# Altium schematic symbol library Inductor.SchLib: 326 symbols (part 4 of 7)
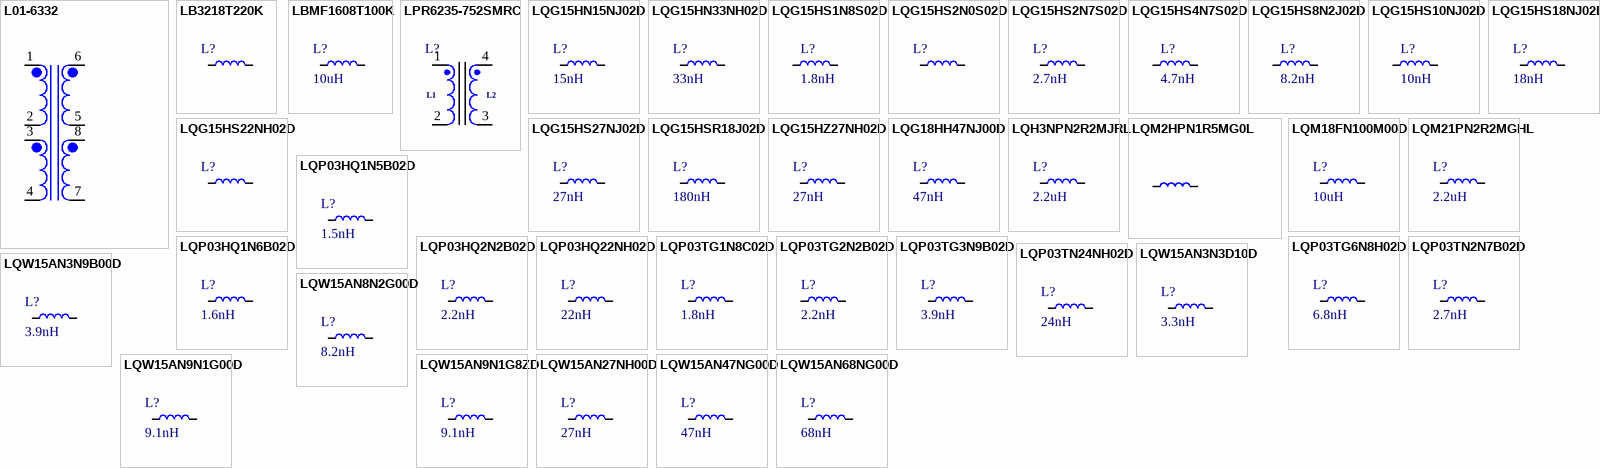
[diagram p11: symbols L01-6332 to LQW15AN68NG00D]

## LQM21PN2R2MGHL
designator L?, comment 2.2uH
FIXED IND 2.2UH 1.3A 156MOHM SMD; Manufacturer: Murata; Manufacturer Part Number: LQM21PN2R2MGHL; Item Type: Fixed Inductors; Core Material: Ferrite; Saturation Current: 450mA; Shielding: Shielded; DC Resistance (DCR): 156mR; Self Resonant Frequency: 40MHz; Test Frequency: 1MHz; Tolerance: 20%; RMS Current (Irms): 1.7A; Supplier: Mouser; LCSC Part Number: C341781; RoHS: Yes; Stock: 122655; Pricing: 1=0.3, 10=0.246, 50=0.246, 100=0.203, 1000=0.167, 10000=0.129 (USD); Mounting Technology: Surface Mount; Case/Package: 0805; Case Code (Metric): 2012; Case Code (Imperial): 0805; Min Operating Temperature: -40°C; Max Operating Temperature: 85°C; Packaging: Cut Tape; Value: 2.2uH; Current Rating: 1.3A; Series: LQM21PN_GH; ESR: 156mR; Length: 0.079inch; Width: 0.049inch; Height - Seated (Max): 0.039inch; RoHS Compliant: Yes; ComponentLink1URL: http://search.murata.co.jp/Ceramy/image/img/P02/JELF243B-0040.pdf?src-supplier=Digikey; ComponentLink1Description: http://search.murata.co.jp/Ceramy/image/img/P02/JELF243B-0040.pdf?src-supplier=Digikey; ComponentLink2URL: http://www.murata.com/~/media/webrenewal/support/library/catalog/products/inductor/chip/o05e.ashx?src-supplier=Digikey; ComponentLink2Description: http://www.murata.com/~/media/webrenewal/support/library/catalog/products/inductor/chip/o05e.ashx?src-supplier=Digikey
footprint IND-0805 (Inductor 0805)
pins: 1, 2

## LQP03HQ1N5B02D
designator L?, comment 1.5nH
FIXED IND 1.5NH 1A 50 MOHM SMD; Manufacturer: Murata; Manufacturer Part Number: LQP03HQ1N5B02D; Item Type: Inductor; Q Factor: 20NUMBER; Value: 50mR; Supplier: Mouser; LCSC Part Number: C2041489; RoHS: Yes; Stock: 37991; Pricing: 1=0.16, 10=0.104, 50=0.104, 100=0.081, 1000=0.065, 10000=0.057 (USD); RMS Current (Irms): 1A; ESR: 50mR; Height: 420um; ComponentLink1URL: http://www.farnell.com/datasheets/2616670.pdf?src-supplier=Farnell; ComponentLink1Description: http://www.farnell.com/datasheets/2616670.pdf?src-supplier=Farnell; ComponentLink2URL: https://search.murata.co.jp/Ceramy/image/img/P02/JELF243C-0021.pdf?src-supplier=Digikey; ComponentLink2Description: https://search.murata.co.jp/Ceramy/image/img/P02/JELF243C-0021.pdf?src-supplier=Digikey; ComponentLink3URL: http://search.murata.co.jp/Ceramy/image/img/P02/JELF243C-0021.pdf?src-supplier=Digikey; ComponentLink3Description: http://search.murata.co.jp/Ceramy/image/img/P02/JELF243C-0021.pdf?src-supplier=Digikey; ComponentLink4URL: https://datasheet.octopart.com/LQP03HQ1N5B02D-Murata-datasheet-68295820.pdf?src-supplier=Future+Electronics; ComponentLink4Description: https://datasheet.octopart.com/LQP03HQ1N5B02D-Murata-datasheet-68295820.pdf?src-supplier=Future+Electronics; ComponentLink5URL: http://www.farnell.com/datasheets/2616670.pdf?src-supplier=Newark; ComponentLink5Description: http://www.farnell.com/datasheets/2616670.pdf?src-supplier=Newark
footprint IND-0201
pins: 1, 2

## LQP03HQ1N6B02D
designator L?, comment 1.6nH
FIXED IND 1.6NH 1A 50 MOHM SMD; Manufacturer: Murata; Manufacturer Part Number: LQP03HQ1N6B02D; Core Material: Non-Magnetic; Shielding: Unshielded; DC Resistance (DCR): 50mR; Self Resonant Frequency: 10GHz; Test Frequency: 500MHz; Item Type: Inductor; Supplier: Digi-Key; Supplier Part Number: 490-13883-1-ND; RoHS: Yes; Category: Fixed Inductors; Stock: 27606; Pricing: 1=0.16, 10=0.145, 25=0.1236, 50=0.109, 100=0.1, 250=0.09088, 500=0.08544, 1000=0.06545, 2500=0.06181 (USD); Mounting Technology: Surface Mount; Case/Package: 0201; Case Code (Imperial): 0201; Case Code (Metric): 0603; Min Operating Temperature: -55°C; Max Operating Temperature: 125°C; Packaging: Cut Tape; Value: 1.6nH; Current Rating: 1A; Series: LQP03; RoHS Compliant: Yes; ComponentLink1URL: http://search.murata.co.jp/Ceramy/image/img/P02/JELF243C-0021.pdf?src-supplier=Digi-Key; ComponentLink1Description: http://search.murata.co.jp/Ceramy/image/img/P02/JELF243C-0021.pdf?src-supplier=Digi-Key; LCSC Part Number: C237384
footprint IND-0201
pins: 1, 2

## LQP03HQ2N2B02D
designator L?, comment 2.2nH
FIXED IND 2.2NH 600MA 120MOHM SM; Manufacturer: Murata; Manufacturer Part Number: LQP03HQ2N2B02D; Item Type: Inductors; Q Factor: 20NUMBER; Value: 120mR; Supplier: Mouser; LCSC Part Number: C1329438; RoHS: Yes; Stock: 22323; Pricing: 1=0.15, 10=0.096, 50=0.096, 100=0.075, 1000=0.061, 10000=0.056 (USD); RMS Current (Irms): 600mA; ESR: 120mR; Height: 420um; ComponentLink1URL: https://datasheet.octopart.com/LQP03HQ2N2B02D-Murata-datasheet-68295820.pdf?src-supplier=Future+Electronics; ComponentLink1Description: https://datasheet.octopart.com/LQP03HQ2N2B02D-Murata-datasheet-68295820.pdf?src-supplier=Future+Electronics; ComponentLink2URL: http://search.murata.co.jp/Ceramy/image/img/P02/JELF243C-0021.pdf?src-supplier=Digikey; ComponentLink2Description: http://search.murata.co.jp/Ceramy/image/img/P02/JELF243C-0021.pdf?src-supplier=Digikey; ComponentLink3URL: https://search.murata.co.jp/Ceramy/image/img/P02/JELF243C-0021.pdf?src-supplier=Digikey; ComponentLink3Description: https://search.murata.co.jp/Ceramy/image/img/P02/JELF243C-0021.pdf?src-supplier=Digikey; ComponentLink4URL: https://datasheet.octopart.com/LQP03HQ2N2B02D-Murata-datasheet-112158819.pdf?src-supplier=Newark; ComponentLink4Description: https://datasheet.octopart.com/LQP03HQ2N2B02D-Murata-datasheet-112158819.pdf?src-supplier=Newark; ComponentLink5URL: https://datasheet.octopart.com/LQP03HQ2N2B02D-Murata-datasheet-150539062.pdf?src-supplier=Arrow.cn; ComponentLink5Description: https://datasheet.octopart.com/LQP03HQ2N2B02D-Murata-datasheet-150539062.pdf?src-supplier=Arrow.cn
footprint IND-0201
pins: 1, 2

## LQP03HQ22NH02D
designator L?, comment 22nH
FIXED IND 22NH 250MA 820MOHM SMD; Manufacturer: Murata; Manufacturer Part Number: LQP03HQ22NH02D; Item Type: Inductors; Supplier: Mouser; LCSC Part Number: C1329450; RoHS: Yes; Stock: 18723; Pricing: 1=0.11, 10=0.072, 50=0.072, 100=0.056, 1000=0.046, 10000=0.045 (USD); ComponentLink1URL: https://datasheet.octopart.com/LQP03HQ22NH02D-Murata-datasheet-140317290.pdf?src-supplier=Farnell; ComponentLink1Description: https://datasheet.octopart.com/LQP03HQ22NH02D-Murata-datasheet-140317290.pdf?src-supplier=Farnell; ComponentLink2URL: https://search.murata.co.jp/Ceramy/image/img/P02/JELF243C-0021.pdf?src-supplier=Digikey; ComponentLink2Description: https://search.murata.co.jp/Ceramy/image/img/P02/JELF243C-0021.pdf?src-supplier=Digikey; ComponentLink3URL: http://search.murata.co.jp/Ceramy/image/img/P02/JELF243C-0021.pdf?src-supplier=Digikey; ComponentLink3Description: http://search.murata.co.jp/Ceramy/image/img/P02/JELF243C-0021.pdf?src-supplier=Digikey; ComponentLink4URL: https://datasheet.octopart.com/LQP03HQ22NH02D-Murata-datasheet-68295820.pdf?src-supplier=Future+Electronics; ComponentLink4Description: https://datasheet.octopart.com/LQP03HQ22NH02D-Murata-datasheet-68295820.pdf?src-supplier=Future+Electronics; ComponentLink5URL: https://datasheet.octopart.com/LQP03HQ22NH02D-Murata-datasheet-142046015.pdf?src-supplier=Arrow.cn; ComponentLink5Description: https://datasheet.octopart.com/LQP03HQ22NH02D-Murata-datasheet-142046015.pdf?src-supplier=Arrow.cn
footprint IND-0201
pins: 1, 2

## LQP03TG1N8C02D
designator L?, comment 1.8nH
FIXED IND 1.8NH 500MA 200MOHM SM; Manufacturer: Murata; Manufacturer Part Number: LQP03TG1N8C02D; Item Type: Inductors; Shielding: Unshielded; DC Resistance (DCR): 200mR; Self Resonant Frequency: 12.5GHz; Test Frequency: 500MHz; Supplier: Mouser; LCSC Part Number: C341782; RoHS: Yes; Stock: 23430; Pricing: 1=0.1, 10=0.032, 50=0.032, 100=0.022, 1000=0.016, 10000=0.01 (USD); Mounting Technology: Surface Mount; Case/Package: 0201; Case Code (Metric): 0603; Case Code (Imperial): 0201; Min Operating Temperature: -55°C; Max Operating Temperature: 125°C; Package Quantity: 15000; Packaging: Tape and Reel; Current Rating: 500mA; Value: 1.8nH; DC Current: 500mA; Series: LQP03TG_02; Technology: THIN FILM; Length: 0.024inch; Width: 0.012inch; Height - Seated (Max): 0.013inch; Depth: 0.33mm; Military Standard: Not; RoHS Compliant: Yes; ComponentLink1URL: https://datasheet.ciiva.com/29692/jelf243c-0016-29692539.pdf?src-supplier=Digikey; ComponentLink1Description: https://datasheet.ciiva.com/29692/jelf243c-0016-29692539.pdf?src-supplier=Digikey
footprint IND-0201
pins: 1, 2

## LQP03TG2N2B02D
designator L?, comment 2.2nH
FIXED IND 2.2NH 450MA 250MOHM SM; Manufacturer: Murata; Manufacturer Part Number: LQP03TG2N2B02D; Item Type: Inductors; Shielding: Unshielded; DC Resistance (DCR): 250mR; Self Resonant Frequency: 6GHz; Test Frequency: 500MHz; Supplier: Mouser; LCSC Part Number: C341782; RoHS: Yes; Stock: 35433; Pricing: 1=0.1, 10=0.021, 50=0.021, 100=0.015, 1000=0.013, 10000=0.01 (USD); Mounting Technology: Surface Mount; Case/Package: 0201; Min Operating Temperature: -55°C; Max Operating Temperature: 125°C; Current Rating: 450mA; Packaging: Tape and Reel; Series: LQP03TG_02; Package Quantity: 15000; Value: 2.2nH; Max DC Current: 450mA; DC Current: 450mA; Technology: THIN FILM; Length: 0.024inch; Width: 0.012inch; Height: 0.3mm; Depth: 0.33mm; Height - Seated (Max): 0.013inch; Military Standard: Not; RoHS Compliant: Yes; ComponentLink1URL: https://datasheet.ciiva.com/29691/jelf243c-0016-29691343.pdf?src-supplier=Digikey; ComponentLink1Description: https://datasheet.ciiva.com/29691/jelf243c-0016-29691343.pdf?src-supplier=Digikey
footprint IND-0201
pins: 1, 2

## LQP03TG3N9B02D
designator L?, comment 3.9nH
FIXED IND 3.9NH 350MA 350MOHM SM; Manufacturer: Murata; Manufacturer Part Number: LQP03TG3N9B02D; Item Type: Inductors; Shielding: Unshielded; DC Resistance (DCR): 350mR; Self Resonant Frequency: 6GHz; Test Frequency: 500MHz; Supplier: Digikey; LCSC Part Number: C86114; RoHS: Yes; Stock: 170; Pricing: 1=0.1, 10=0.025, 25=0.0224, 50=0.0208, 100=0.0193, 250=0.01748, 500=0.0162, 1000=0.01502, 2500=0.01358 (USD); Mounting Technology: Surface Mount; Case/Package: 0201; Min Operating Temperature: -55°C; Max Operating Temperature: 125°C; Package Quantity: 15000; Packaging: Tape and Reel; Current Rating: 350mA; Value: 3.9nH; Max DC Current: 350mA; DC Current: 350mA; Series: LQP03TG_02; Technology: THIN FILM; Length: 0.024inch; Width: 0.012inch; Height: 0.3mm; Height - Seated (Max): 0.013inch; Depth: 0.33mm; Military Standard: Not; RoHS Compliant: Yes; ComponentLink1URL: https://datasheet.ciiva.com/29691/jelf243c-0016-29691349.pdf?src-supplier=Digikey; ComponentLink1Description: https://datasheet.ciiva.com/29691/jelf243c-0016-29691349.pdf?src-supplier=Digikey
footprint IND-0201
pins: 1, 2

## LQP03TG6N8H02D
designator L?, comment 6.8nH
FIXED IND 6.8NH 200MA 1.15OHM SM; Manufacturer: Murata; Manufacturer Part Number: LQP03TG6N8H02D; Tolerance: 3%; Shielding: Unshielded; DC Resistance (DCR): 1.15R; Self Resonant Frequency: 5.4GHz; Test Frequency: 500MHz; Item Type: Inductor; Supplier: Digikey; Supplier Part Number: 490-LQP03TG6N8H02DCT-ND; RoHS: Yes; Category: Fixed Inductors; Stock: 13400; Pricing: 1=0.1, 10=0.025, 25=0.024, 50=0.0204, 100=0.0172, 250=0.01644, 500=0.01494, 1000=0.01255, 2500=0.01075 (USD); Mounting Technology: Surface Mount; Case/Package: 0201; Min Operating Temperature: -55°C; Max Operating Temperature: 125°C; Current Rating: 200mA; Packaging: Tape and Reel; Package Quantity: 15000; Value: 6.8nH; DC Current: 200mA; Series: LQP03TG_02; Technology: THIN FILM; Length: 0.024inch; Width: 0.012inch; Height - Seated (Max): 0.013inch; Depth: 0.33mm; Military Standard: Not; RoHS Compliant: Yes; ComponentLink1URL: https://datasheet.octopart.com/LQP03TG6N8H02D-Murata-datasheet-140317395.pdf?src-supplier=Farnell; ComponentLink1Description: https://datasheet.octopart.com/LQP03TG6N8H02D-Murata-datasheet-140317395.pdf?src-supplier=Farnell; ComponentLink2URL: https://search.murata.co.jp/Ceramy/image/img/P02/JELF243C-0016.pdf?src-supplier=Digikey; ComponentLink2Description: https://search.murata.co.jp/Ceramy/image/img/P02/JELF243C-0016.pdf?src-supplier=Digikey; LCSC Part Number: C86120
footprint IND-0201
pins: 1, 2

## LQP03TN2N7B02D
designator L?, comment 2.7nH
FIXED IND 2.7NH 500MA 200MOHM SM; Manufacturer: Murata; Manufacturer Part Number: LQP03TN2N7B02D; Core Material: Non-Magnetic; Self Resonant Frequency: 6GHz; Tolerance: 3%; Shielding: Unshielded; DC Resistance (DCR): 200mR; Q Factor: 14; Current: 350mA; Test Frequency: 500MHz; Item Type: Inductor; Supplier 1: Rs; RoHS: Yes; Category: Fixed Inductors; Stock 1: 4000; Pricing 1: 200=0.007 (GBP); Mount: Surface Mount; Case/Package: 0201; Case Code (Metric): 0603; Case Code (Imperial): 0201; Min Operating Temperature: -55°C; Max Operating Temperature: 125°C; Packaging: Tape and Reel; Package Quantity: 1; Current Rating: 500mA; Inductance: 2.7nH; Max DC Current: 500mA; Termination: SMD/SMT; DC Current: 500mA; Series: LQP03TN_02; Technology: THIN FILM; Length: 0.024inch; Width: 0.012inch; Height: 0.3mm; Height - Seated (Max): 0.013inch; Depth: 0.33mm; Military Standard: Not; Reach SVHC Compliant: No; Lead Free: Lead Free; RoHS Compliant: Yes; ComponentLink1URL: http://www.farnell.com/datasheets/1888743.pdf?src-supplier=Farnell; ComponentLink1Description: http://www.farnell.com/datasheets/1888743.pdf?src-supplier=Farnell; ComponentLink2URL: http://www.mouser.com/ds/2/281/c51e-794816.pdf?src-supplier=Mouser; ComponentLink2Description: http://www.mouser.com/ds/2/281/c51e-794816.pdf?src-supplier=Mouser; ComponentLink3URL: https://media.digikey.com/pdf/Data%20Sheets/Murata%20PDFs/LQP03_Series_Br.pdf?src-supplier=Digi-Key; ComponentLink3Description: https://media.digikey.com/pdf/Data%20Sheets/Murata%20PDFs/LQP03_Series_Br.pdf?src-supplier=Digi-Key; ComponentLink4URL: http://components.arrow.com/part/dataview/49670632S8721729N2606?src-supplier=Arrow+Electronics; ComponentLink4Description: http://components.arrow.com/part/dataview/49670632S8721729N2606?src-supplier=Arrow+Electronics; ComponentLink5URL: https://datasheet.octopart.com/LQP03TN2N7B02D-Murata-datasheet-26765549.pdf?src-supplier=Future+Electronics; ComponentLink5Description: https://datasheet.octopart.com/LQP03TN2N7B02D-Murata-datasheet-26765549.pdf?src-supplier=Future+Electronics; ComponentLink6URL: http://psearch.en.murata.com/inductor/product/LQP03TN2N7B02%23.pdf?src-supplier=Avnet; ComponentLink6Description: http://psearch.en.murata.com/inductor/product/LQP03TN2N7B02%23.pdf?src-supplier=Avnet; ComponentLink7URL: http://search.murata.co.jp/Ceramy/image/img/w_hinm/S0084E.pdf?src-supplier=Digi-Key; ComponentLink7Description: http://search.murata.co.jp/Ceramy/image/img/w_hinm/S0084E.pdf?src-supplier=Digi-Key; ComponentLink8URL: http://www.farnell.com/datasheets/1888743.pdf?src-supplier=Newark; ComponentLink8Description: http://www.farnell.com/datasheets/1888743.pdf?src-supplier=Newark; ComponentLink9URL: http://www.farnell.com/datasheets/1888743.pdf?src-supplier=Element14; ComponentLink9Description: http://www.farnell.com/datasheets/1888743.pdf?src-supplier=Element14; ComponentLink10URL: https://datasheet.octopart.com/LQP03TN2N7B02D-Murata-datasheet-141404629.pdf?src-supplier=TME; ComponentLink10Description: https://datasheet.octopart.com/LQP03TN2N7B02D-Murata-datasheet-141404629.pdf?src-supplier=TME; Supplier Part Number 1: 1065349; LCSC Part Number: C98043
footprint IND-0201
pins: 1, 2

## LQP03TN24NH02D
designator L?, comment 24nH
140mA 24nH ±3% 2.3Ω 0201 Inductors (SMD) ROHS; Manufacturer: Murata; Manufacturer Part Number: LQP03TN24NH02D; Core Material: Non-Magnetic; Shielding: Unshielded; DC Resistance (DCR): 2.3R; Self Resonant Frequency: 2GHz; Test Frequency: 500MHz; Supplier: Digi-Key; Supplier Part Number: 490-13004-1-ND; RoHS: Yes; Category: Fixed Inductors; Stock: 40849; Pricing: 1=0.1, 10=0.041, 25=0.0364, 50=0.031, 100=0.0273, 250=0.025, 500=0.02272, 1000=0.01909, 2500=0.01636 (USD); Mounting Technology: Surface Mount; Case/Package: 0201; Case Code (Metric): 0603; Case Code (Imperial): 0201; Min Operating Temperature: -55°C; Max Operating Temperature: 125°C; Package Quantity: 15000; Packaging: Tape and Reel; Tolerance: 3%; Current Rating: 140mA; Value: 24nH; DC Current: 140mA; Series: LQP03TN_02; Technology: THIN FILM; Length: 0.024inch; Width: 0.012inch; Height - Seated (Max): 0.013inch; Depth: 0.33mm; Military Standard: Not; RoHS Compliant: Yes; ComponentLink1URL: https://datasheet.ciiva.com/29692/s0084e-29692461.pdf?src-supplier=Digi-Key; ComponentLink1Description: https://datasheet.ciiva.com/29692/s0084e-29692461.pdf?src-supplier=Digi-Key; LCSC Part Number: C206441; Item Type: Inductor
footprint IND-0201
pins: 1, 2

## LQW15AN3N3D10D
designator L?, comment 3.3nH
FIXED IND 3.3NH 900MA 0.04OHM SM; Manufacturer: Murata; Manufacturer Part Number: LQW15AN3N3D10D; Item Type: Fixed Inductors; Core Material: Non-Magnetic,Air; DC Resistance (DCR): 40mR; Shielding: Unshielded; Current: 800mA; Self Resonant Frequency: 12GHz; Test Frequency: 100MHz; Supplier: Arrow Electronics; LCSC Part Number: C98061; RoHS: Yes; Stock: 20000; Pricing: 10000=0.0448 (USD); Mounting Technology: Surface Mount; Case/Package: 0402; Pins: 2; Weight: 2.8E-05oz; Case Code (Metric): 1005; Case Code (Imperial): 0402; Min Operating Temperature: -55°C; Max Operating Temperature: 125°C; Value: 3.3nH; Max DC Current: 900mA; Packaging: Tape and Reel; Package Quantity: 1; Current Rating: 900mA; Termination: SMD/SMT; DC Current: 900mA; Series: LQW15A_10; Max Current Rating: 900mA; Length: 1mm; Width: 0.02inch; Height: 0.5mm; Depth: 0.7mm; Height - Seated (Max): 0.024inch; Radiation Hardening: No; Reach SVHC Compliant: No; Military Standard: Not; Lead Free: Lead Free; RoHS Compliant: Yes; ComponentLink1URL: https://datasheet.ciiva.com/11799/0900766b8090d5c4-11799120.pdf?src-supplier=Rs; ComponentLink1Description: https://datasheet.ciiva.com/11799/0900766b8090d5c4-11799120.pdf?src-supplier=Rs; ComponentLink2URL: https://datasheet.ciiva.com/6705/l0075s0080lqw15a-10-6705512.pdf?src-supplier=Digikey; ComponentLink2Description: https://datasheet.ciiva.com/6705/l0075s0080lqw15a-10-6705512.pdf?src-supplier=Digikey; ComponentLink3URL: https://datasheet.ciiva.com/6705/l0075s0080lqw15a-10-6705511.pdf?src-supplier=Digikey; ComponentLink3Description: https://datasheet.ciiva.com/6705/l0075s0080lqw15a-10-6705511.pdf?src-supplier=Digikey; ComponentLink4URL: https://datasheet.ciiva.com/6705/l0075s0080lqw15a-10-6705513.pdf?src-supplier=Digikey; ComponentLink4Description: https://datasheet.ciiva.com/6705/l0075s0080lqw15a-10-6705513.pdf?src-supplier=Digikey; ComponentLink5URL: https://datasheet.ciiva.com/4976/product-4976988.pdf?src-supplier=Mouser; ComponentLink5Description: https://datasheet.ciiva.com/4976/product-4976988.pdf?src-supplier=Mouser; ComponentLink6URL: https://datasheet.ciiva.com/8506/l0075s0080lqw15a-10-8506007.pdf?src-supplier=Avnet; ComponentLink6Description: https://datasheet.ciiva.com/8506/l0075s0080lqw15a-10-8506007.pdf?src-supplier=Avnet; ComponentLink7URL: https://datasheet.ciiva.com/16455/l0075s0080lqw15a-10-16455870.pdf?src-supplier=Future+Electronics; ComponentLink7Description: https://datasheet.ciiva.com/16455/l0075s0080lqw15a-10-16455870.pdf?src-supplier=Future+Electronics
footprint IND-0402
pins: 1, 2

## LQW15AN3N9B00D
designator L?, comment 3.9nH
FIXED IND 3.9NH 750MA 0.07OHM SM; Manufacturer: Murata; Manufacturer Part Number: LQW15AN3N9B00D; Item Type: Fixed Inductors; Core Material: Non-Magnetic,Air,Ferrite; DC Resistance (DCR): 70mR; Shielding: Unshielded; Self Resonant Frequency: 10GHz; Test Frequency: 100MHz; Supplier: Arrow Electronics; LCSC Part Number: C98062; RoHS: Yes; Stock: 67; Pricing: 1=0.0649, 10=0.0594, 25=0.0393 (USD); Mounting Technology: Surface Mount; Case/Package: 0402; Pins: 2; Weight: 2.8E-05oz; Case Code (Metric): 1005; Case Code (Imperial): 0402; Min Operating Temperature: -55°C; Max Operating Temperature: 125°C; Value: 3.9nH; Max DC Current: 750mA; Package Quantity: 1; Packaging: Tape and Reel; Current: 750mA; Termination: SMD/SMT; DC Current: 750mA; Series: LQW15A_00; Length: 1mm; Width: 0.5mm; Height: 0.5mm; Depth: 0.7mm; Radiation Hardening: No; Reach SVHC Compliant: No; Military Standard: Not; Lead Free: Lead Free; RoHS Compliant: Yes; ComponentLink1URL: https://datasheet.ciiva.com/30490/0900766b8125623e-30490279.pdf?src-supplier=Rs; ComponentLink1Description: https://datasheet.ciiva.com/30490/0900766b8125623e-30490279.pdf?src-supplier=Rs; ComponentLink2URL: https://datasheet.ciiva.com/6709/l0075s0080lqw15a-00-6709974.pdf?src-supplier=Digikey; ComponentLink2Description: https://datasheet.ciiva.com/6709/l0075s0080lqw15a-00-6709974.pdf?src-supplier=Digikey; ComponentLink3URL: https://datasheet.ciiva.com/6709/l0075s0080lqw15a-00-6709976.pdf?src-supplier=Digikey; ComponentLink3Description: https://datasheet.ciiva.com/6709/l0075s0080lqw15a-00-6709976.pdf?src-supplier=Digikey; ComponentLink4URL: https://datasheet.ciiva.com/4977/product-4977516.pdf?src-supplier=Mouser; ComponentLink4Description: https://datasheet.ciiva.com/4977/product-4977516.pdf?src-supplier=Mouser; ComponentLink5URL: https://datasheet.ciiva.com/8507/l0075s0080lqw15a-00-8507481.pdf?src-supplier=Avnet; ComponentLink5Description: https://datasheet.ciiva.com/8507/l0075s0080lqw15a-00-8507481.pdf?src-supplier=Avnet; ComponentLink6URL: https://datasheet.ciiva.com/16455/l0075s0080lqw15a-00-16455877.pdf?src-supplier=Future+Electronics; ComponentLink6Description: https://datasheet.ciiva.com/16455/l0075s0080lqw15a-00-16455877.pdf?src-supplier=Future+Electronics
footprint IND-0402
pins: 1, 2

## LQW15AN8N2G00D
designator L?, comment 8.2nH
FIXED IND 8.2NH 540MA 0.14OHM SM; Manufacturer: Murata; Manufacturer Part Number: LQW15AN8N2G00D; Item Type: Fixed Inductors; Core Material: Non-Magnetic,Ferrite; Tolerance: 2%; DC Resistance (DCR): 140mR; Shielding: Unshielded; Self Resonant Frequency: 5.5GHz; Q Factor: 25; Test Frequency: 100MHz; Supplier: Mouser; LCSC Part Number: C84404; RoHS: Yes; Stock: 47249; Pricing: 1=0.11, 10=0.094, 50=0.094, 100=0.078, 1000=0.064, 10000=0.052 (USD); Mounting Technology: Surface Mount; Case/Package: 0402; Pins: 2; Weight: 2.8E-05oz; Case Code (Metric): 1005; Case Code (Imperial): 0402; Min Operating Temperature: -55°C; Max Operating Temperature: 125°C; Value: 8.2nH; Packaging: Tape and Reel; Max DC Current: 540mA; Series: LQW15A_00; Package Quantity: 1; Inductance Tolerance: 2%; Termination: SMD/SMT; DC Current: 540mA; Max Current Rating: 540mA; RMS Current (Irms): 540mA; ESR: 140mR; Length: 1mm; Width: 0.5mm; Height: 0.5mm; Depth: 0.7mm; Radiation Hardening: No; Reach SVHC Compliant: No; Lead Free: Lead Free; Military Standard: Not; RoHS Compliant: Yes; ComponentLink1URL: https://datasheet.ciiva.com/11799/0900766b8090d800-11799384.pdf?src-supplier=Rs; ComponentLink1Description: https://datasheet.ciiva.com/11799/0900766b8090d800-11799384.pdf?src-supplier=Rs; ComponentLink2URL: https://datasheet.ciiva.com/16455/l0075s0080lqw15a-00-16455832.pdf?src-supplier=Future+Electronics; ComponentLink2Description: https://datasheet.ciiva.com/16455/l0075s0080lqw15a-00-16455832.pdf?src-supplier=Future+Electronics
footprint IND-0402
pins: 1, 2

## LQW15AN9N1G00D
designator L?, comment 9.1nH
FIXED IND 9.1NH 540MA 0.14OHM SM; Manufacturer: Murata; Manufacturer Part Number: LQW15AN9N1G00D; Item Type: nductors; Supplier: Future Electronics; LCSC Part Number: C113122; RoHS: Yes; Stock: 200000; Pricing: 10000=0.0438, 20000=0.0428, 30000=0.0422, 40000=0.0418, 50000=0.0404 (USD); ComponentLink1URL: https://datasheet.ciiva.com/11799/0900766b8090d800-11799088.pdf?src-supplier=Rs; ComponentLink1Description: https://datasheet.ciiva.com/11799/0900766b8090d800-11799088.pdf?src-supplier=Rs; ComponentLink2URL: https://datasheet.ciiva.com/6709/l0075s0080lqw15a-00-6709884.pdf?src-supplier=Digikey; ComponentLink2Description: https://datasheet.ciiva.com/6709/l0075s0080lqw15a-00-6709884.pdf?src-supplier=Digikey; ComponentLink3URL: https://datasheet.ciiva.com/6709/l0075s0080lqw15a-00-6709886.pdf?src-supplier=Digikey; ComponentLink3Description: https://datasheet.ciiva.com/6709/l0075s0080lqw15a-00-6709886.pdf?src-supplier=Digikey; ComponentLink4URL: https://datasheet.ciiva.com/4978/product-4978396.pdf?src-supplier=Mouser; ComponentLink4Description: https://datasheet.ciiva.com/4978/product-4978396.pdf?src-supplier=Mouser; ComponentLink5URL: https://datasheet.ciiva.com/16455/l0075s0080lqw15a-00-16455836.pdf?src-supplier=Future+Electronics; ComponentLink5Description: https://datasheet.ciiva.com/16455/l0075s0080lqw15a-00-16455836.pdf?src-supplier=Future+Electronics
footprint IND-0402
pins: 1, 2

## LQW15AN9N1G8ZD
designator L?, comment 9.1nH
FIXED IND 9.1NH 1.4A 0.08OHM SMD; Manufacturer: Murata; Manufacturer Part Number: LQW15AN9N1G8ZD; Item Type: Fixed Inductors; Supplier: Mouser; LCSC Part Number: C1330593; RoHS: Yes; Stock: 16863; Pricing: 1=0.16, 10=0.134, 50=0.118, 100=0.111, 1000=0.091, 10000=0.074 (USD); ComponentLink1URL: https://search.murata.co.jp/Ceramy/image/img/P02/JELF243A-9138.pdf?src-supplier=Digikey; ComponentLink1Description: https://search.murata.co.jp/Ceramy/image/img/P02/JELF243A-9138.pdf?src-supplier=Digikey; ComponentLink2URL: https://datasheet.octopart.com/LQW15AN9N1G8ZD-Murata-datasheet-140317541.pdf?src-supplier=Farnell; ComponentLink2Description: https://datasheet.octopart.com/LQW15AN9N1G8ZD-Murata-datasheet-140317541.pdf?src-supplier=Farnell
footprint IND-0402
pins: 1, 2

## LQW15AN27NH00D
designator L?, comment 27nH
FIXED IND 27NH 280MA 0.52OHM SMD; Manufacturer: Murata; Manufacturer Part Number: LQW15AN27NH00D; Item Type: Inductors; Core Material: Non-Magnetic,Air,Ferrite; Tolerance: 3%; Shielding: Unshielded; Q Factor: 25; DC Resistance (DCR): 520mR; Self Resonant Frequency: 3.5GHz; Test Frequency: 100MHz; Current: 260mA; Supplier: Mouser; LCSC Part Number: C113111; RoHS: Yes; Stock: 11953; Pricing: 1=0.11, 10=0.09, 50=0.09, 100=0.075, 1000=0.061, 10000=0.051 (USD); Mounting Technology: Surface Mount; Case/Package: 0402; Weight: 2.8E-05oz; Case Code (Metric): 1005; Case Code (Imperial): 0402; Min Operating Temperature: -55°C; Max Operating Temperature: 125°C; Package Quantity: 1; Current Rating: 280mA; Packaging: Tape and Reel; Value: 27nH; Max DC Current: 280mA; Termination: SMD/SMT; DC Current: 280mA; Series: LQW15A_00; Length: 1mm; Width: 0.02inch; Height: 0.5mm; Height - Seated (Max): 0.024inch; Depth: 0.6mm; Military Standard: Not; Lead Free: Lead Free; RoHS Compliant: Yes; ComponentLink1URL: https://datasheet.ciiva.com/11799/0900766b8090d5c4-11799061.pdf?src-supplier=Rs; ComponentLink1Description: https://datasheet.ciiva.com/11799/0900766b8090d5c4-11799061.pdf?src-supplier=Rs; ComponentLink2URL: https://datasheet.ciiva.com/6705/l0075s0080lqw15a-00-6705353.pdf?src-supplier=Digikey; ComponentLink2Description: https://datasheet.ciiva.com/6705/l0075s0080lqw15a-00-6705353.pdf?src-supplier=Digikey; ComponentLink3URL: https://datasheet.ciiva.com/6705/l0075s0080lqw15a-00-6705350.pdf?src-supplier=Digikey; ComponentLink3Description: https://datasheet.ciiva.com/6705/l0075s0080lqw15a-00-6705350.pdf?src-supplier=Digikey; ComponentLink4URL: https://datasheet.ciiva.com/6705/l0075s0080lqw15a-00-6705354.pdf?src-supplier=Digikey; ComponentLink4Description: https://datasheet.ciiva.com/6705/l0075s0080lqw15a-00-6705354.pdf?src-supplier=Digikey; ComponentLink5URL: https://datasheet.ciiva.com/8507/l0075s0080lqw15a-00-8507608.pdf?src-supplier=Avnet; ComponentLink5Description: https://datasheet.ciiva.com/8507/l0075s0080lqw15a-00-8507608.pdf?src-supplier=Avnet
footprint IND-0402
pins: 1, 2

## LQW15AN47NG00D
designator L?, comment 47nH
FIXED IND 47NH 210MA 1.08OHM SMD; Manufacturer: Murata; Manufacturer Part Number: LQW15AN47NG00D; Item Type: Fixed Inductors; Core Material: Non-Magnetic,Air,Ferrite; Tolerance: 2%; DC Resistance (DCR): 1.08R; Shielding: Unshielded; Q Factor: 25; Current: 600mA; Self Resonant Frequency: 2.9GHz; Test Frequency: 100MHz; Supplier: Arrow Electronics; LCSC Part Number: C22334; RoHS: Yes; Stock: 371; Pricing: 371=0.0431 (USD); Mounting Technology: Surface Mount; Case/Package: 0402; Pins: 2; Weight: 2.8E-05oz; Case Code (Metric): 1005; Case Code (Imperial): 0402; Min Operating Temperature: -55°C; Max Operating Temperature: 125°C; Value: 47nH; Max DC Current: 210mA; Packaging: Tape and Reel; Package Quantity: 1; Inductance Tolerance: 2%; Termination: SMD/SMT; DC Current: 210mA; Series: LQW15A_00; RMS Current (Irms): 210mA; ESR: 1.08R; Length: 1mm; Width: 0.5mm; Height: 0.5mm; Depth: 0.6mm; Reach SVHC Compliant: No; Military Standard: Not; Lead Free: Lead Free; RoHS Compliant: Yes; ComponentLink1URL: https://datasheet.ciiva.com/11799/0900766b8090d800-11799167.pdf?src-supplier=Rs; ComponentLink1Description: https://datasheet.ciiva.com/11799/0900766b8090d800-11799167.pdf?src-supplier=Rs; ComponentLink2URL: https://datasheet.ciiva.com/6709/l0075s0080lqw15a-00-6709897.pdf?src-supplier=Digikey; ComponentLink2Description: https://datasheet.ciiva.com/6709/l0075s0080lqw15a-00-6709897.pdf?src-supplier=Digikey; ComponentLink3URL: https://datasheet.ciiva.com/6709/l0075s0080lqw15a-00-6709899.pdf?src-supplier=Digikey; ComponentLink3Description: https://datasheet.ciiva.com/6709/l0075s0080lqw15a-00-6709899.pdf?src-supplier=Digikey; ComponentLink4URL: https://datasheet.ciiva.com/4976/product-4976502.pdf?src-supplier=Mouser; ComponentLink4Description: https://datasheet.ciiva.com/4976/product-4976502.pdf?src-supplier=Mouser; ComponentLink5URL: https://datasheet.ciiva.com/8507/l0075s0080lqw15a-00-8507529.pdf?src-supplier=Avnet; ComponentLink5Description: https://datasheet.ciiva.com/8507/l0075s0080lqw15a-00-8507529.pdf?src-supplier=Avnet; ComponentLink6URL: https://datasheet.ciiva.com/16455/l0075s0080lqw15a-00-16455878.pdf?src-supplier=Future+Electronics; ComponentLink6Description: https://datasheet.ciiva.com/16455/l0075s0080lqw15a-00-16455878.pdf?src-supplier=Future+Electronics
footprint IND-0402
pins: 1, 2

## LQW15AN68NG00D
designator L?, comment 68nH
FIXED IND 68NH 140MA 1.96OHM SMD; Manufacturer: Murata; Manufacturer Part Number: LQW15AN68NG00D; Item Type: Inductor; Core Material: Non-Magnetic,Air,Ferrite; Tolerance: 2%; DC Resistance (DCR): 1.96R; Shielding: Unshielded; Q Factor: 20; Self Resonant Frequency: 2.5GHz; Test Frequency: 100MHz; Current: 570mA; Supplier: Future Electronics; LCSC Part Number: C108965; RoHS: Yes; Stock: 10000; Pricing: 10000=0.0443, 20000=0.0432, 30000=0.0426, 40000=0.0422, 50000=0.0408 (USD); Mounting Technology: Surface Mount; Case/Package: 0402; Pins: 2; Weight: 2.8E-05oz; Case Code (Metric): 1005; Case Code (Imperial): 0402; Min Operating Temperature: -55°C; Max Operating Temperature: 125°C; Value: 68nH; Max DC Current: 140mA; Package Quantity: 1; Packaging: Tape and Reel; Inductance Tolerance: 2%; Termination: SMD/SMT; DC Current: 140mA; Series: LQW15A_00; RMS Current (Irms): 140mA; ESR: 1.96R; Length: 1mm; Width: 0.5mm; Height: 0.5mm; Depth: 0.6mm; Radiation Hardening: No; Reach SVHC Compliant: No; Military Standard: Not; Lead Free: Lead Free; RoHS Compliant: Yes; ComponentLink1URL: https://datasheet.ciiva.com/11799/0900766b8090d800-11799373.pdf?src-supplier=Rs; ComponentLink1Description: https://datasheet.ciiva.com/11799/0900766b8090d800-11799373.pdf?src-supplier=Rs; ComponentLink2URL: https://datasheet.ciiva.com/36857/460962-36857115.pdf?src-supplier=Element14; ComponentLink2Description: https://datasheet.ciiva.com/36857/460962-36857115.pdf?src-supplier=Element14; ComponentLink3URL: https://datasheet.ciiva.com/6709/l0075s0080lqw15a-00-6709896.pdf?src-supplier=Digikey; ComponentLink3Description: https://datasheet.ciiva.com/6709/l0075s0080lqw15a-00-6709896.pdf?src-supplier=Digikey; ComponentLink4URL: https://datasheet.ciiva.com/6709/l0075s0080lqw15a-00-6709895.pdf?src-supplier=Digikey; ComponentLink4Description: https://datasheet.ciiva.com/6709/l0075s0080lqw15a-00-6709895.pdf?src-supplier=Digikey; ComponentLink5URL: https://datasheet.ciiva.com/6709/l0075s0080lqw15a-00-6709898.pdf?src-supplier=Digikey; ComponentLink5Description: https://datasheet.ciiva.com/6709/l0075s0080lqw15a-00-6709898.pdf?src-supplier=Digikey; ComponentLink6URL: https://datasheet.ciiva.com/8508/l0075s0080lqw15a-00-8508445.pdf?src-supplier=Avnet; ComponentLink6Description: https://datasheet.ciiva.com/8508/l0075s0080lqw15a-00-8508445.pdf?src-supplier=Avnet
footprint IND-0402
pins: 1, 2

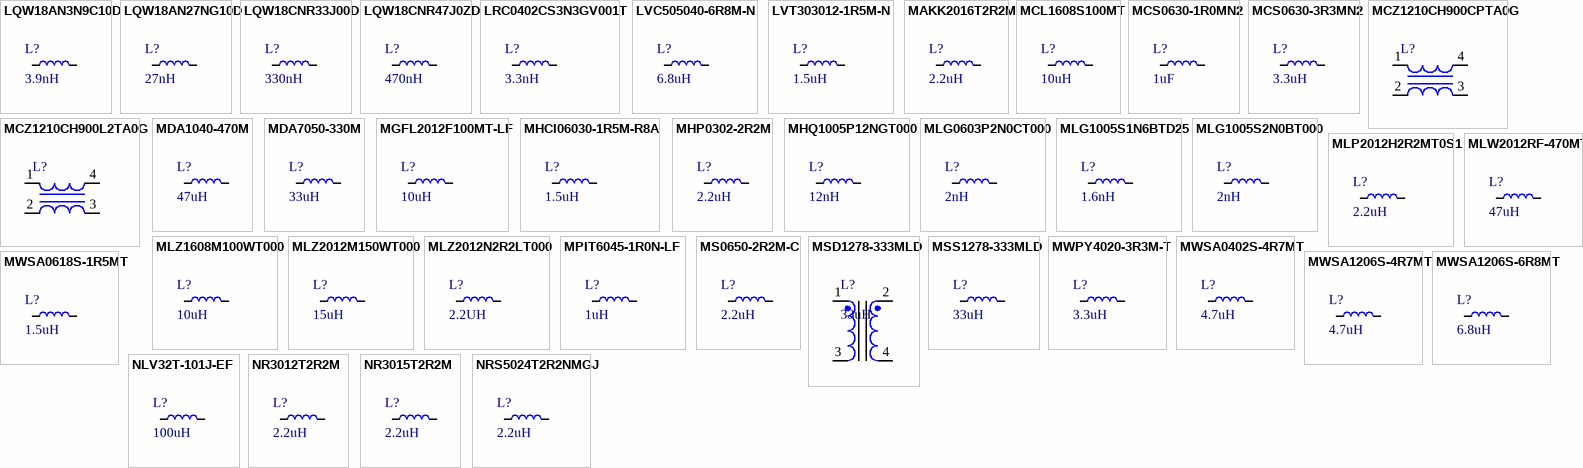
[diagram p4: symbols LQW18AN3N9C10D to NRS5024T2R2NMGJ]

## LQW18AN3N9C10D
designator L?, comment 3.9nH
FIXED IND 3.9NH 1A 32 MOHM SMD; Manufacturer: Murata; Manufacturer Part Number: LQW18AN3N9C10D; Core Material: Non-Magnetic; Shielding: Unshielded; Self Resonant Frequency: 11GHz; DC Resistance (DCR): 32mR; Q Factor: 38; Test Frequency: 100MHz; Item Type: Inductor; Supplier 1: RSComponents; RoHS: Yes; Category: Fixed Inductors; Stock 1: 1; Pricing 1: 10=0.16800 (USD); Mount: Surface Mount; Case/Package: 0603; Weight: 0.000106oz; Case Code (Metric): 1608; Case Code (Imperial): 0603; Min Operating Temperature: -55°C; Max Operating Temperature: 125°C; Packaging: Tape and Reel; Inductance: 3.9nH; Package Quantity: 4000; Current Rating: 1A; Resistor Type: Wirewound; Max DC Current: 1A; Termination: SMD/SMT; DC Current: 1A; Series: LQW18A_10; Length: 1.6mm; Width: 0.031inch; Height: 0.8mm; Height - Seated (Max): 0.039inch; Depth: 1.1mm; Radiation Hardening: No; REACH SVHC: No SVHC; Military Standard: Not; RoHS Compliant: Yes; ComponentLink1URL: https://datasheet.ciiva.com/11799/0900766b80a002db-11799288.pdf?src-supplier=RSComponents; ComponentLink1Description: https://datasheet.ciiva.com/11799/0900766b80a002db-11799288.pdf?src-supplier=RSComponents; ComponentLink2URL: https://datasheet.ciiva.com/6705/l0075s0080lqw18a-10-6705579.pdf?src-supplier=Digi-Key; ComponentLink2Description: https://datasheet.ciiva.com/6705/l0075s0080lqw18a-10-6705579.pdf?src-supplier=Digi-Key; ComponentLink3URL: https://datasheet.ciiva.com/6705/l0075s0080lqw18a-10-6705577.pdf?src-supplier=Digi-Key; ComponentLink3Description: https://datasheet.ciiva.com/6705/l0075s0080lqw18a-10-6705577.pdf?src-supplier=Digi-Key; ComponentLink4URL: https://datasheet.ciiva.com/6705/l0075s0080lqw18a-10-6705578.pdf?src-supplier=Digi-Key; ComponentLink4Description: https://datasheet.ciiva.com/6705/l0075s0080lqw18a-10-6705578.pdf?src-supplier=Digi-Key; ComponentLink5URL: https://datasheet.ciiva.com/4976/product-4976636.pdf?src-supplier=Mouser; ComponentLink5Description: https://datasheet.ciiva.com/4976/product-4976636.pdf?src-supplier=Mouser; Supplier Part Number 1: 7242951; LCSC Part Number: C521237
footprint IND-0603 (1608 Metric) (0.063" L x 0.032" W (1.60mm x 0.80mm))
pins: 1, 2

## LQW18AN27NG10D
designator L?, comment 27nH
FIXED IND 27NH 590MA 116MOHM SMD; Manufacturer: Murata; Manufacturer Part Number: LQW18AN27NG10D; Core Material: Non-Magnetic; Tolerance: 2%; DC Resistance (DCR): 116mR; Shielding: Unshielded; Self Resonant Frequency: 2.8GHz; Q Factor: 42; Test Frequency: 100MHz; Item Type: Inductor; Supplier 1: Arrow Electronics; RoHS: Yes; Category: Fixed Inductors; Stock 1: 3528; Pricing 1: 1=0.17550, 10=0.13260, 25=0.13120, 100=0.10470, 250=0.09530, 500=0.08580, 1000=0.07160, 3000=0.06500 (USD); Mount: Surface Mount; Case/Package: 0603; Weight: 0.000106oz; Case Code (Metric): 1608; Case Code (Imperial): 0603; Min Operating Temperature: -55°C; Max Operating Temperature: 125°C; Inductance: 27nH; Packaging: Tape and Reel; Max DC Current: 590mA; Inductance Tolerance: 2%; Package Quantity: 1; Current Rating: 590mA; Resistor Type: Wirewound; Termination: SMD/SMT; DC Current: 590mA; Series: LQW18A_10; Length: 1.6mm; Width: 0.031inch; Height: 0.8mm; Depth: 1.1mm; Height - Seated (Max): 0.039inch; Radiation Hardening: No; Lead Free: Lead Free; Military Standard: Not; Reach SVHC Compliant: Yes; RoHS Compliant: Yes; ComponentLink1URL: https://datasheet.ciiva.com/11799/0900766b80a002db-11799175.pdf?src-supplier=RSComponents; ComponentLink1Description: https://datasheet.ciiva.com/11799/0900766b80a002db-11799175.pdf?src-supplier=RSComponents; ComponentLink2URL: https://datasheet.ciiva.com/6705/l0075s0080lqw18a-10-6705574.pdf?src-supplier=Digi-Key; ComponentLink2Description: https://datasheet.ciiva.com/6705/l0075s0080lqw18a-10-6705574.pdf?src-supplier=Digi-Key; ComponentLink3URL: https://datasheet.ciiva.com/8507/l0075s0080lqw18a-10-8507510.pdf?src-supplier=Avnet; ComponentLink3Description: https://datasheet.ciiva.com/8507/l0075s0080lqw18a-10-8507510.pdf?src-supplier=Avnet; ComponentLink4URL: https://datasheet.ciiva.com/4978/product-4978252.pdf?src-supplier=Mouser; ComponentLink4Description: https://datasheet.ciiva.com/4978/product-4978252.pdf?src-supplier=Mouser; Supplier Part Number 1: LQW18AN27NG10D; LCSC Part Number: C701182
footprint IND-0603 (1608 Metric) (0.063" L x 0.032" W (1.60mm x 0.80mm))
pins: 1, 2

## LQW18CNR33J00D
designator L?, comment 330nH
0603 330nH ±5% DCR=250mΩ 630mA SRF=600MHz; Manufacturer: Murata; Manufacturer Part Number: LQW18CNR33J00D; Core Material: Ferrite; Self Resonant Frequency: 600MHz; Shielding: Unshielded; DC Resistance (DCR): 250mR; Test Frequency: 10MHz; Supplier 1: RSComponents; RoHS: Yes; Category: Fixed Inductors; Stock 1: 440; Pricing 1: 200=0.12100, 500=0.10900, 1000=0.09900, 2000=0.08900 (GBP); Mount: Surface Mount; Case/Package: 0603; Weight: 0.000141oz; Case Code (Metric): 1608; Case Code (Imperial): 0603; Min Operating Temperature: -40°C; Max Operating Temperature: 85°C; Tolerance: 5%; Packaging: Tape and Reel; Package Quantity: 4000; Current Rating: 630mA; Resistor Type: Wirewound; Inductance: 330nH; Max DC Current: 630mA; Termination: SMD/SMT; DC Current: 630mA; Inductance Tolerance: 5%; Series: LQW18C; Length: 0.063inch; Width: 0.031inch; Height: 0.8mm; Height - Seated (Max): 0.037inch; Depth: 0.95mm; REACH SVHC: No SVHC; Military Standard: Not; RoHS Compliant: Yes; ComponentLink1URL: https://datasheet.ciiva.com/8508/l0075s0093lqw18c-8508566.pdf?src-supplier=Avnet; ComponentLink1Description: https://datasheet.ciiva.com/8508/l0075s0093lqw18c-8508566.pdf?src-supplier=Avnet; ComponentLink2URL: https://datasheet.ciiva.com/29691/o05e-29691902.pdf?src-supplier=Digi-Key; ComponentLink2Description: https://datasheet.ciiva.com/29691/o05e-29691902.pdf?src-supplier=Digi-Key; Supplier Part Number 1: 1065371P
footprint IND-0603 (1608 Metric) (0.063" L x 0.032" W (1.60mm x 0.80mm))
pins: 1, 2

## LQW18CNR47J0ZD
designator L?, comment 470nH
FIXED IND 470NH 500MA 450MOHM SM; Manufacturer: Murata; Manufacturer Part Number: LQW18CNR47J0ZD; Core Material: Ferrite; Tolerance: 5%; Shielding: Unshielded; DC Resistance (DCR): 450mR; Self Resonant Frequency: 555MHz; Test Frequency: 10MHz; Item Type: Inductor; Supplier: Digi-Key; Supplier Part Number: 490-LQW18CNR47J0ZDCT-ND; RoHS: Yes; Category: Fixed Inductors; Stock: 4304; Pricing: 1=0.53, 10=0.46, 25=0.4268, 50=0.361, 100=0.3282, 250=0.30856, 500=0.27572, 1000=0.22321 (USD); Mounting Technology: Surface Mount; Case/Package: 0603; Min Operating Temperature: -40°C; Max Operating Temperature: 125°C; Series: LQW18; Value: 470nH; Ratings: AEC-Q200; RoHS Compliant: Yes; ComponentLink1URL: https://search.murata.co.jp/Ceramy/image/img/P02/JELF243A-9145.pdf?src-supplier=Digi-Key; ComponentLink1Description: https://search.murata.co.jp/Ceramy/image/img/P02/JELF243A-9145.pdf?src-supplier=Digi-Key; ComponentLink2URL: https://datasheet.octopart.com/LQW18CNR47J0ZD-Murata-datasheet-150573715.pdf?src-supplier=Newark; ComponentLink2Description: https://datasheet.octopart.com/LQW18CNR47J0ZD-Murata-datasheet-150573715.pdf?src-supplier=Newark; LCSC Part Number: C560039
footprint IND-0603 (1608 Metric) (0.063" L x 0.032" W (1.60mm x 0.80mm))
pins: 1, 2

## LRC0402CS3N3GV001T
designator L?, comment 3.3nH
Fixed Ind 3.3NH 300MA 190MOHM Sm; Manufacturer: Johanson; Manufacturer Part Number: LRC0402CS3N3GV001T; Item Type: Inductors; Supplier: Digikey; Supplier Part Number: 712-LRC0402CS3N3GV001TCT-ND; RoHS: Yes; Stock: 663707; Pricing: 1=0.1, 10=0.03, 100=0.0247, 1000=0.02034, 5000=0.01774 (USD); RoHS Compliant: Yes
footprint IND-0402
pins: 1, 2

## LVC505040-6R8M-N
designator L?, comment 6.8uH
2.7A 6.8uH ±20% 50mΩ SMD Power Inductors ROHS; Manufacturer Part Number: LVC505040-6R8M-N; Manufacturer: Chlisin Elec; ComponentLink1Description: LCSC; ComponentLink1URL: https://www.lcsc.com/product-detail/Power-Inductors_Chilisin-Elec-LVC505040-6R8M-N_C285870.html; Value: 6.8uH; Footprint: Custom; LCSC Part Number: C285870; Item Type: Inductor
footprint LVC505040-6R8M-N_
pins: 1, 2

## LVT303012-1R5M-N
designator L?, comment 1.5uH
2.34A 1.5uH Shielded Power Inductors ±20% SMD Power Inductors ROHS; Manufacturer: Chilisin Elec; Manufacturer Part Number: LVT303012-1R5M-N; Package: SMD; LCSC Part Number: C280560; Item Type: Inductor; ComponentLink1Description: LCSC; ComponentLink1URL: https://www.lcsc.com/product-detail/Power-Inductors_Chilisin-Elec-LVT303012-1R5M-N_C280560.html
footprint LVT303012-1R5M-N
pins: 1, 2

## MAKK2016T2R2M
designator L?, comment 2.2uH
FIXED IND 2.2UH 1.5A 160MOHM SMD; Manufacturer: Taiyo Yuden; Manufacturer Part Number: MAKK2016T2R2M; Core Material: Metal; Tolerance: 20%; Shielding: Shielded; DC Resistance (DCR): 160mR; Test Frequency: 2MHz; Item Type: Inductor; Supplier 1: Mouser; RoHS: Yes; Category: Fixed Inductors; Stock 1: 64320; Pricing 1: 1=0.27000, 10=0.17200, 50=0.17200, 100=0.14000, 1000=0.10600, 10000=0.09200 (USD); Mount: Surface Mount; Case/Package: 0806; Case Code (Metric): 2016; Case Code (Imperial): 0806; Min Operating Temperature: -40°C; Max Operating Temperature: 105°C; Packaging: Tape and Reel; Package Quantity: 3000; Resistor Type: Wirewound; Inductance: 2.2uH; Current Rating: 1.5A; Saturation Current: 1.5A; Max DC Current: 1.5A; Termination: SMD/SMT; Length: 0.079inch; Width: 0.063inch; Height: 1mm; Height - Seated (Max): 0.039inch; Depth: 1.6mm; Radiation Hardening: No; Halogen Free: Halogen Free; RoHS Compliant: Yes; ComponentLink1URL: https://datasheet.ciiva.com/30014/makk2016t2r2m-ss-30014449.pdf?src-supplier=Avnet; ComponentLink1Description: https://datasheet.ciiva.com/30014/makk2016t2r2m-ss-30014449.pdf?src-supplier=Avnet; Supplier Part Number 1: 963-MAKK2016T2R2M; LCSC Part Number: C92923
footprint MAKK2016T2R2M_
pins: 1, 2

## MCL1608S100MT
designator L?, comment 10uH
50mA 10uH ±20% 1.17Ω 0603 Inductors (SMD) ROHS; Manufacturer: SUNLORD; Manufacturer Part Number: MCL1608S100MT; Value: 10uH; Footprint: 0603; ComponentLink1Description: LCSC; ComponentLink1URL: https://www.lcsc.com/product-detail/Inductors-SMD_Sunlord-MCL1608S100MT_C51942.html; LCSC Part Number: C51942
footprint IND-0603 (1608 Metric) (0.063" L x 0.032" W (1.60mm x 0.80mm))
pins: 1, 2

## MCS0630-1R0MN2
designator L?, comment 1uF
11A 1uH ±20% SMD Power Inductors ROHS; Manufacturer: PSA; Manufacturer Part Number: MCS0630-1R0MN2; Package: SMD; LCSC Part Number: C385251; Item Type: Inductor; ComponentLink1Description: LCSC; ComponentLink1URL: https://www.lcsc.com/product-detail/Power-Inductors_PSA-Prosperity-Dielectrics-MCS0630-1R0MN2_C385251.html
footprint MCS0630-1R0MN2
pins: 1, 2

## MCS0630-3R3MN2
designator L?, comment 3.3uH
6A 3.3uH ±20% SMD Power Inductors ROHS; Manufacturer: PSA(Prosperity Dielectrics); Manufacturer Part Number: MCS0630-3R3MN2; Package: SMD; LCSC Part Number: C394166; Item Type: Inductor; ComponentLink1Description: LCSC; ComponentLink1URL: https://www.lcsc.com/product-detail/Power-Inductors_PSA-Prosperity-Dielectrics-MCS0630-3R3MN2_C394166.html
footprint MCS0630-3R3MN2
pins: 1, 2

## MCZ1210CH900CPTA0G
designator L?
Common Mode Filters / Chokes, |Z|=90Ω at 100MHz, L x W x T :; Manufacturer: TDK; Manufacturer Part Number: MCZ1210CH900CPTA0G; Item Type: Common Mode Choke; Supplier 1: Digikey; RoHS: No; Stock 1: 2571; Pricing 1: 1=0.54, 10=0.464, 25=0.4248, 50=0.3862, 100=0.3438, 250=0.32444, 500=0.2781, 1000=0.2472 (USD); Supplier Part Number 1: 445-MCZ1210CH900CPTA0GCT-ND
footprint MCZ1210CH900CPTA0G
pins: 1, 2, 3, 4

## MCZ1210CH900L2TA0G
designator L?
CMC 100MA 2LN 90 OHM SMD; Manufacturer: TDK; Manufacturer Part Number: MCZ1210CH900L2TA0G; Item Type: Common Mode Chokes; Supplier: Digikey; Supplier Part Number: 445-MCZ1210CH900L2CT-ND; RoHS: Yes; Stock: 26958; Pricing: 1=0.54, 10=0.464, 25=0.4248, 50=0.3862, 100=0.3438, 250=0.32444, 500=0.2781, 1000=0.2472 (USD); LCSC Part Number: C307688
footprint MCZ1210CH900L2
pins: 1, 2, 3, 4

## MDA1040-470M
designator L?, comment 47uH
3.5A 47uH ±20% 4A 125mΩ SMD,10x11mm Inductors (SMD) ROHS; Manufacturer: KOHERelec; Manufacturer Part Number: MDA1040-470M; LCSC Part Number: C2847557; Package: SMD,10x11mm; ComponentLink1Description: LCSC; ComponentLink1URL: https://www.lcsc.com/product-detail/Inductors-SMD_KOHERelec-MDA1040-470M_C2847557.html; Item Type: Inductor
footprint MDA1040-470M
pins: 1, 2

## MDA7050-330M
designator L?, comment 33uH
33uH 2.3A ±20% SMD,6.6x7.3mm Inductors; Manufacturer: KOHERelec; Manufacturer Part Number: MDA7050-330M; LCSC Part Number: C2847546; Package: SMD,6.6x7.3mm; ComponentLink1Description: LCSC; ComponentLink1URL: https://www.lcsc.com/product-detail/Inductors-SMD_KOHERelec-MDA7050-330M_C2847546.html; Item Type: Inductor
footprint MDA7050_330M
pins: 1, 2

## MGFL2012F100MT-LF
designator L?, comment 10uH
IND SMD 10uH 500mA 0805; Manufacturer: microgate; Manufacturer Part Number: MGFL2012F100MT-LF; Tolerance: ±20%; DC Resistance (DCR): 320mΩ; Item Type: Inductor; Inductance: 10uH; Rated Current: 500mA; LCSC Part Number: C281113
footprint Ind-0805 (Inductor 0805)
pins: 1, 2

## MHCI06030-1R5M-R8A
designator L?, comment 1.5uH
10A 1.5uH ±20% 12.1mΩ SMD Power Inductors ROHS; Manufacturer Part Number: MHCI06030-1R5M-R8A; Manufacturer: Chilisin Elec; LCSC Part Number: C329386; Value: 1.5uH; Item Type: Inductor; ComponentLink1Description: LCSC; ComponentLink1URL: https://www.lcsc.com/product-detail/Power-Inductors_Chilisin-Elec-MHCI06030-1R5M-R8A_C329386.html
footprint MHCI06030-1R5M-R8A
pins: 1, 2

## MHP0302-2R2M
designator L?, comment 2.2uH
2.8A 2.2uH ±20% 60mΩ 4A SMD,3.4x3x1.8mm Power Inductors ROHS; Manufacturer: Me-TECH; Manufacturer Part Number: MHP0302-2R2M; Footprint: Custom; ComponentLink1Description: LCSC; ComponentLink1URL: https://lcsc.com/product-detail/Power-Inductors_Me-TECH-MHP0302-2R2M_C2934937.html; LCSC Part Number: C2934937
footprint MHP0302-2R2M_
pins: 1, 2

## MHQ1005P12NGT000
designator L?, comment 12nH
FIXED IND 12NH 450MA 240MOHM SMD; Manufacturer: TDK; Manufacturer Part Number: MHQ1005P12NGT000; Item Type: Inductor; Supplier: Digikey; Supplier Part Number: 445-175572-1-ND; RoHS: Yes; Category: Fixed Inductors; Stock: 5317; Pricing: 1=0.18, 10=0.149, 25=0.1368, 50=0.1208, 100=0.1057, 250=0.10068, 500=0.09464, 1000=0.07249, 2500=0.06846 (USD); ComponentLink1URL: https://datasheet.ciiva.com/29693/inductor-commercial-high-frequency-mhq-en-29693630.pdf?src-supplier=Digikey; ComponentLink1Description: https://datasheet.ciiva.com/29693/inductor-commercial-high-frequency-mhq-en-29693630.pdf?src-supplier=Digikey; LCSC Part Number: C3911363
footprint IND-0402
pins: 1, 2

## MLG0603P2N0CT000
designator L?, comment 2nH
FIXED IND 2NH 600MA 100 MOHM SMD; Manufacturer: TDK; Manufacturer Part Number: MLG0603P2N0CT000; Core Material: Non-Magnetic; Shielding: Unshielded; DC Resistance (DCR): 100mR; Self Resonant Frequency: 8.5GHz; Test Frequency: 500MHz; Item Type: Inductor; Supplier: Digi-Key; Supplier Part Number: 445-172431-1-ND; RoHS: Yes; Category: Fixed Inductors; Stock: 23499; Pricing: 1=0.13, 10=0.118, 25=0.1, 50=0.0882, 100=0.0808, 250=0.07352, 500=0.06908, 1000=0.05292, 2500=0.04998 (USD); Mounting Technology: Surface Mount; Case/Package: 0201; Case Code (Metric): 0603; Case Code (Imperial): 0201; Min Operating Temperature: -55°C; Max Operating Temperature: 125°C; Package Quantity: 15000; Packaging: Cut Tape; Current Rating: 600mA; Value: 2nH; Series: MLG-P; Length: 0.024inch; Width: 0.012inch; Height - Seated (Max): 0.013inch; RoHS Compliant: Yes; ComponentLink1URL: https://datasheet.ciiva.com/41860/inductor-commercial-high-frequency-mlg-qp-en-41860968.pdf?src-supplier=Digi-Key; ComponentLink1Description: https://datasheet.ciiva.com/41860/inductor-commercial-high-frequency-mlg-qp-en-41860968.pdf?src-supplier=Digi-Key; LCSC Part Number: C531323
footprint IND-0201
pins: 1, 2